# Altium integrated library passive.IntLib: 122 symbols (part 2 of 2)
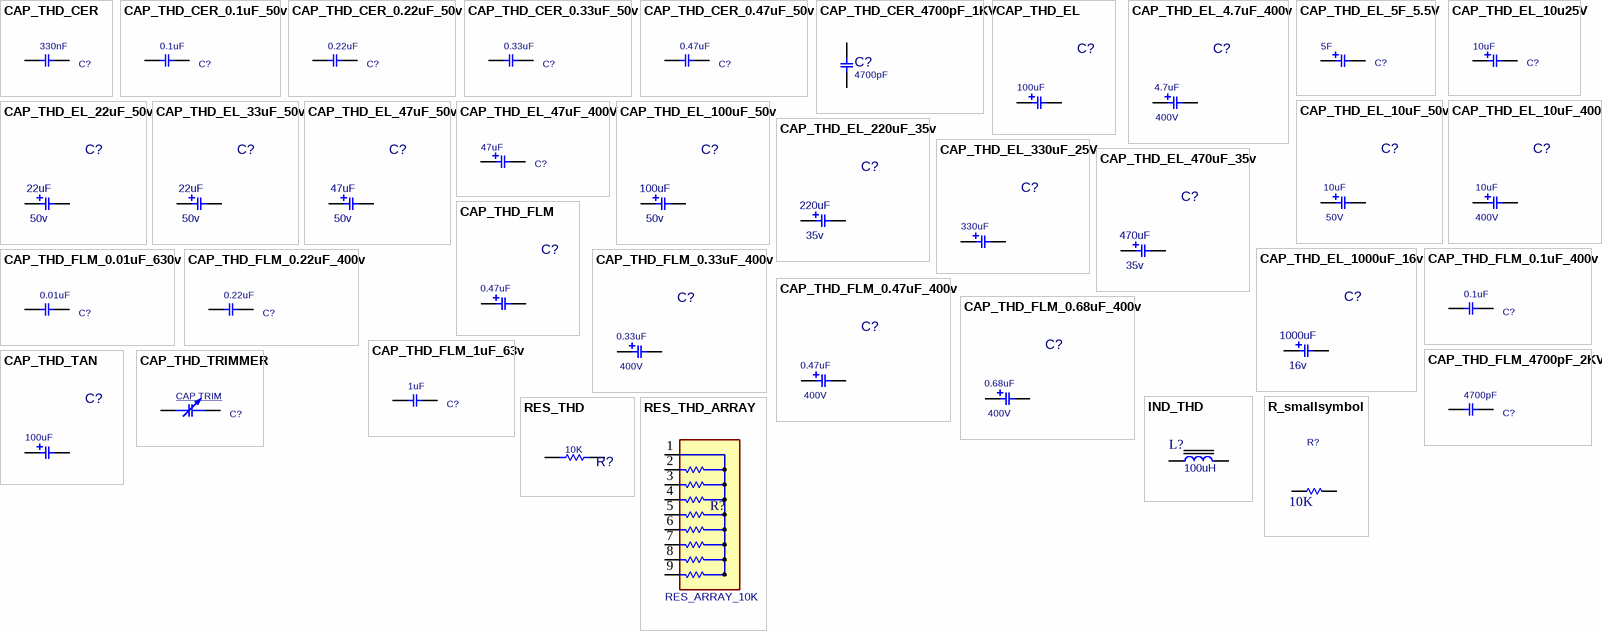
[diagram p4: symbols CAP_THD_CER to RES_THD_ARRAY]

## CAP_THD_FLM_4700pF_2KV
designator C?, comment 4700pF
CAP, FILM; PARAM: 5%, -55~105°C; DESC: CAP, FILM,; MANF_P#: R747I1470AA00J; MANF: KEMET; PARAM2: 2KV; PRICE: 0.6$; ASSEMBLY: ASSEMBLY; VALUE: 4700pF
footprint C_FLM_19X8H11 (CAP, POLYESTER, MKT, 18X5, 19.0X8.0mm pitch: 15.0mm, 0.22uF 400V)
pins: 1, 2

## CAP_THD_TAN
designator C?, comment 100uF
CAP, THD, TANTAL; MANF_P#: MANF_PART#; PARAM2: 25V; DESC: DESCRIPTION; DIST#: MOUSER; PARAM: 20%; PRICE: 10= 5$; MANF: MANF; ASSEMBLY: ASSEMBLY; VALUE: 100uF
footprint C_TAN_THD_4H7 (Capacitor, Polarized Radial Bead, Pin spacing 2.54mm - Body Diameter 4.5mm X Body Height 7.1mm)
footprint C_TAN_THD_4H8 (Capacitor, Polarized Radial Bead, Pin spacing 5.08mm - Body Diameter 4.5mm X Body Height 8.5mm)
footprint C_TAN_THD_5H8 (Capacitor, Polarized Radial Bead, Pin spacing 2.54mm - Body Diameter 5.5mm X Body Height 8.4mm)
footprint C_TAN_THD_5H9 (Capacitor, Polarized Radial Bead, Pin spacing 2.54mm - Body Diameter 5.5mm X Body Height 9mm)
footprint C_TAN_THD_6H10 (Capacitor, Polarized Radial Bead, Pin spacing 2.54mm - Body Diameter 6.0mm X Body Height 10mm)
footprint C_TAN_THD_6H11 (Capacitor, Polarized Radial Bead, Pin spacing 5.08mm - Body Diameter 6mm X Body Height 11.5mm)
footprint C_TAN_THD_9H15 (Capacitor, Polarized Radial Bead, Pin spacing 5.08mm - Body Diameter 8.9mm X Body Height 15.5mm)
footprint C_TAN_THD_10H18 (Capacitor, Polarized Radial Bead, Pin spacing 5.08mm - Body Diameter 10.2mm X Body Height 18.6mm)
pins: 1, 2

## CAP_THD_TRIMMER
designator C?, comment CAP TRIM
CAP, THD, TRIMMER; DESC: CAP, SMD, TRIMMER; MANF_P#: MANF_PART#; PARAM: PARAM; PRICE: 100= 1$; MANF: MANF; PARAM2: PARAM2; ASSEMBLY: ASSEMBLY; VALUE: CAP TRIM
footprint CTRM_6X6
footprint CTRM_10X10 (Trimmer Capacitor 10X10mm 3P)
pins: 1, 2

## IND_THD
designator L?, comment 100uH
INDUCTOR, THD; VALUE: 100uH
footprint LTOR_15X6 (INDUCTOR, TORIOD, 15.0X6.0mm)
footprint LTOR_25X10 (INDUCTOR, TORIOD, 25.0X10.0mm)
footprint LTOR_15X6B (INDUCTOR, TORIOD, 15.0X6.0mm BENDED)
footprint LTOR_25X10B (INDUCTOR, TORIOD, 25.0X10.0mm BENDED)
footprint LT_AX04 (INDUCTOR, Axial, 9.8mm,)
footprint LT_AX025 (INDUCTOR, Axial, 6.4mm,)
footprint LT_C6 (INDUCTOR, Cylinder, 6mm,)
footprint LT_C7 (INDUCTOR, Cylinder, 7.5mm,)
footprint LT_C10 (INDUCTOR, Cylinder, 10mm,)
pins: 1, 2

## R_smallsymbol
designator R?, comment 10K
VALUE: 10K
pins: 1, 2

## RES_THD
designator R?, comment 10K
RESISTOR, THD; MANF_P#: RK73H1ETTP4701F; MANF: KOA SPEER; PARAM: 0.063W; DESC: DESCRIPTION; DIST#: MOUSER; PARAM2: 1%; ASSEMBLY: ASSEMBLY; PRICE: 100= 0.5$; VALUE: 10K
footprint R0125W_AX025 (RESISTOR 1/8 WATT, AXIAL0.25)
footprint R1W_AX06 (RESISTOR 1 WATT, AXIAL0.6)
footprint R2W_AX08 (RESISTOR 2 WATT, AXIAL0.8)
footprint R2W_AX_VER (RESISTOR 2 WATT, AXIAL0.8)
footprint R3W_AX09 (RESISTOR 3 WATT, AXIAL0.9)
footprint RWW4W (RESISTOR 4 WATT, Ceramic Wirewound)
footprint R05W_AX05 (RESISTOR 0.5 WATT, AXIAL0.5)
footprint R025W_AX04 (RESISTOR 1/4 WATT, AXIAL0.4)
footprint R025W_AX_VER (RESISTOR 1/4 WATT, AXIAL0.4)
footprint R0125W_AX03 (RESISTOR 1/8 WATT, AXIAL0.3 INCH SPACING)
footprint R0125W_AX_VER (RESISTOR 1/8 WATT, AXIAL0.25)
footprint RWW2W_VER (RESISTOR 2 WATT, Wirewound)
footprint RWW10W_VER (RESISTOR 10 WATT, Wirewound)
footprint R10W_AX11 (RESISTOR 10 WATT, AXIAL1.1)
footprint R10W_AX14 (RESISTOR 10 WATT, AXIAL1.4)
footprint R10W_AX20 (RESISTOR 10 WATT, AXIAL2.0)
footprint RWW5W (Footprint not found)
footprint RWW5W_VER (Footprint not found)
pins: 1, 2

## RES_THD_ARRAY
designator R?, comment RES_ARRAY_10K
RESISTOR, THD, Array, 8RES; VALUE: RES_ARRAY_10K
footprint RES_ARRAYX8
pins: 1, 2, 3, 4, 5, 6, 7, 8, 9